# EAGLE library part APS6404L-3SQR (library ce_fdd_v40)
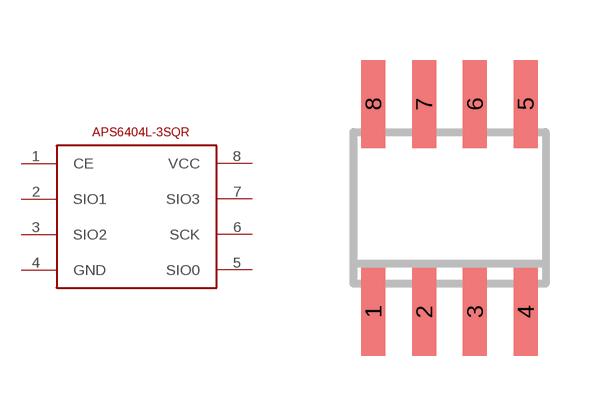
[diagram p2: symbol with the pads of SOP-8L; footprint SOP-8L]

Designator prefix -

## APS6404L-3SQR  [SOP-8L]
1  CE
2  SIO1
3  SIO2
4  GND
5  SIO0
6  SCK
7  SIO3
8  VCC

## Footprint SOP-8L (pad centres in mm)
smd 0.6 x 2.2: 1 -1.905,-2.6; 2 -0.635,-2.6; 3 0.635,-2.6; 4 1.905,-2.6; 5 1.905,2.6; 6 0.635,2.6; 7 -0.635,2.6; 8 -1.905,2.6